# Altium footprint library LimeMicroAltiumLib.PcbLib: 876 footprints (part 23 of 57)
Each footprint in its own frame and in the unit in brackets; x right, y up, seen from the top. Pads: shape width x height; smd on the part's side, far side on the other; paste and mask are expansions set on the pad; w line width, h text height; cw(c..) or ccw(c..) is an arc to the next point about the centre after c.
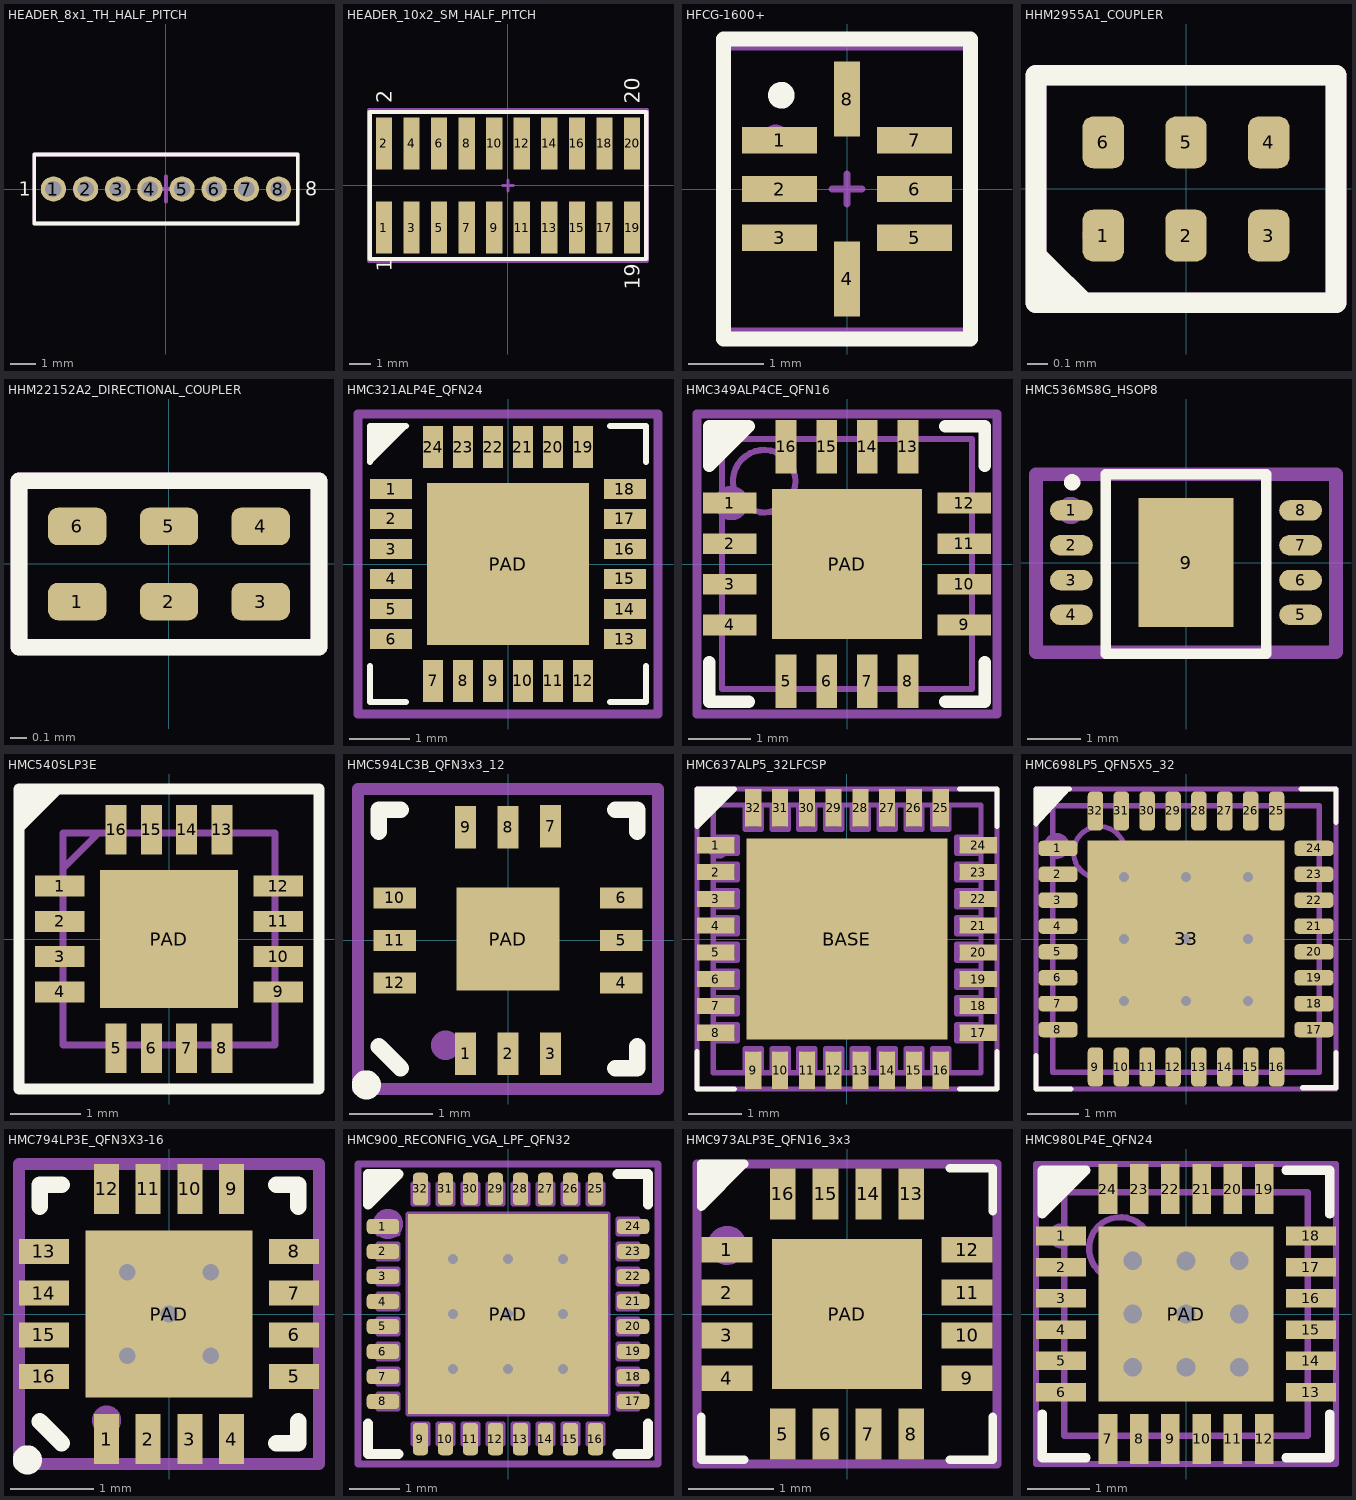
[diagram p22: the footprints below, top view; thin cyan lines are the x and y axes]

## HEADER_8x1_TH_HALF_PITCH [mm]
pads (8):
  round 1 hole 0.65 mask+0.05: 1(-4.445,0) 2(-3.175,0) 3(-1.905,0) 4(-0.635,0) 5(0.635,0) 6(1.905,0) 7(3.175,0) 8(4.445,0)
Top Overlay:
  lines w0.15: -5.205,-1.365 5.205,-1.365 5.205,1.365 -5.205,1.365 -5.205,-1.365
  text "1" at -5.805,-0.265 h0.55
  text "8" at 5.495,-0.265 h0.55
Mechanical 15:
  lines w0.15: -0.5,0 0,0 ; 0,-0.5 0,0 ; 0,0.5 0,0 ; 0.5,0 0,0 ; -5.205,-1.365 -5.205,1.365 5.205,1.365 5.205,-1.365 -5.205,-1.365
  text "1" at -4.53,-0.29 h0.55
  text "8" at 4.295,-0.265 h0.55
  text ".Designator" at 0,0 h0.55
3D body "User Library-PinHeader1_27_2.STEP": height 5, standoff -2.3, extent 2.54,-1.2 5.08,1.2
3D body "User Library-PinHeader1_27_2.STEP": height 5, standoff -2.3, extent -2.54,-1.2 0,1.2
3D body "User Library-PinHeader1_27_2.STEP": height 5, standoff -2.3, extent -5.08,-1.2 -2.54,1.2
3D body "User Library-PinHeader1_27_2.STEP": height 5, standoff -2.3, extent 0,-1.2 2.54,1.2

## HEADER_10x2_SM_HALF_PITCH [mm]
pads (20):
  rect 0.75x2.4 smd: 1(-5.737,-1.95) 2(-5.737,1.95) 3(-4.462,-1.95) 4(-4.462,1.95) 5(-3.187,-1.95) 6(-3.187,1.95) 7(-1.912,-1.95) 8(-1.913,1.95) 9(-0.637,-1.95) 10(-0.638,1.95) 11(0.638,-1.95) 12(0.637,1.95) 13(1.913,-1.95) 14(1.912,1.95) 15(3.188,-1.95) 16(3.187,1.95) 17(4.463,-1.95) 18(4.462,1.95) 19(5.737,-1.95) 20(5.737,1.95)
Top Overlay:
  lines w0.2: -6.387,-3.4 -6.387,3.4 6.388,3.4 6.388,-3.4 -6.387,-3.4
  text "1" at -5.387,-4 h0.7
  text "19" at 6.087,-4.825 h0.7
  text "2" at -5.387,3.8 h0.7
  text "20" at 6.087,3.775 h0.7
Mechanical 15:
  lines w0.15: -0.25,0 0.25,0 ; 0,-0.25 0,0.25 ; -6.437,-3.5 -6.437,3.5 6.438,3.5 6.438,-3.5 -6.437,-3.5
  text ".designator" at 0,0 h0.55
3D body "pin_header_a-sl127-dg-g02mp1.stp": height 6.37, standoff -0.03, extent 5.093,-2.752 6.362,2.752
3D body "pin_header_a-sl127-dg-g02mp1.stp": height 6.37, standoff -0.03, extent 3.818,-2.752 5.087,2.752
3D body "pin_header_a-sl127-dg-g02mp1.stp": height 6.37, standoff -0.03, extent 2.543,-2.752 3.812,2.752
3D body "pin_header_a-sl127-dg-g02mp1.stp": height 6.37, standoff -0.03, extent 1.268,-2.752 2.537,2.752
3D body "pin_header_a-sl127-dg-g02mp1.stp": height 6.37, standoff -0.03, extent -0.007,-2.752 1.262,2.752
3D body "pin_header_a-sl127-dg-g02mp1.stp": height 6.37, standoff -0.03, extent -6.362,-2.752 -5.092,2.752
3D body "pin_header_a-sl127-dg-g02mp1.stp": height 6.37, standoff -0.03, extent -5.092,-2.752 -3.822,2.752
3D body "pin_header_a-sl127-dg-g02mp1.stp": height 6.37, standoff -0.03, extent -3.822,-2.752 -2.552,2.752
3D body "pin_header_a-sl127-dg-g02mp1.stp": height 6.37, standoff -0.03, extent -2.552,-2.752 -1.282,2.752
3D body "pin_header_a-sl127-dg-g02mp1.stp": height 6.37, standoff -0.03, extent -1.282,-2.752 -0.013,2.752

## HFCG-1600+ [mm]
pads (8):
  rect 1x0.35 smd mask+0.05: 1(-0.9,0.65) 2(-0.9,0) 3(-0.9,-0.65) 5(0.9,-0.65) 6(0.9,0) 7(0.9,0.65)
  rect 0.35x1 smd mask+0.05: 4(0,-1.2) 8(0,1.2)
Top Overlay:
  circle w0.254: c-0.875,1.25 r0.05
  lines w0.2: -0.162,2 1.65,2 1.65,-2 -1.65,-2 -1.65,2 0.162,2
Mechanical 15:
  circle w0.254: c-0.95,0.675 r0.056
  lines w0.1: -0.2,0 0,0 ; 0,-0.2 0,0 ; 0,0.2 0,0 ; 0.2,0 0,0 ; -1.6,-1.9 1.6,-1.9 1.6,1.9 -1.6,1.9 -1.6,-1.9
  text ".Designator" at 0,0 h0.55
3D body: height 0.96, standoff 0, extent -0.198,0.3 0.2,0.7
3D body: height 0.95, standoff 0, extent -0.625,-1 0.625,1

## HHM2955A1_COUPLER [mm]
pads (6):
  rrect50% 0.2x0.25 smd mask+0.05: 1(-0.4,-0.225) 2(0,-0.225) 3(0.4,-0.225) 4(0.4,0.225) 5(0,0.225) 6(-0.4,0.225)
Top Overlay:
  region: -0.725,-0.55 -0.725,-0.3 -0.675,-0.3 -0.425,-0.55
  lines w0.1: -0.725,-0.55 -0.725,0.55 0.725,0.55 0.725,-0.55 -0.725,-0.55
Mechanical 15:
  circle w0.1: c-0.4,-0.225 r0.05
  lines w0.1: -0.725,-0.55 0.725,-0.55 0.725,0.55 -0.725,0.55 -0.725,-0.55
  text ".Designator" at 0,0 h0.55
3D body: height 0.61, standoff 0, extent -0.449,-0.2 -0.25,0
3D body: height 0.6, standoff 0, extent -0.5,-0.25 0.5,0.25

## HHM22152A2_DIRECTIONAL_COUPLER [mm]
pads (6):
  rrect50% 0.35x0.225 smd mask+0.05: 1(-0.55,-0.225) 2(0,-0.225) 3(0.55,-0.225) 4(0.55,0.225) 5(0,0.225) 6(-0.55,0.225)
Top Overlay:
  lines w0.1: -0.9,-0.5 0.9,-0.5 0.9,0.5 -0.9,0.5 -0.9,-0.5
Mechanical 15:
  circle w0.1: c-0.55,-0.225 r0.05
  lines w0.1: -0.9,-0.5 0.9,-0.5 0.9,0.5 -0.9,0.5 -0.9,-0.5
  text ".Designator" at 0,0 h0.55
3D body: height 0.61, standoff 0, extent -0.7,-0.3 -0.5,-0.1
3D body: height 0.6, standoff 0, extent -0.8,-0.4 0.8,0.4

## HMC321ALP4E_QFN24 [mm]
pads (25):
  rect 0.7x0.34 smd mask+0.05: 1(-1.95,1.25) 2(-1.95,0.75) 3(-1.95,0.25) 4(-1.95,-0.25) 5(-1.95,-0.75) 6(-1.95,-1.25) 13(1.95,-1.25) 14(1.95,-0.75) 15(1.95,-0.25) 16(1.95,0.25) 17(1.95,0.75) 18(1.95,1.25)
  rect 0.34x0.7 smd mask+0.05: 7(-1.25,-1.95) 8(-0.75,-1.95) 9(-0.25,-1.95) 10(0.25,-1.95) 11(0.75,-1.95) 12(1.25,-1.95) 19(1.25,1.95) 20(0.75,1.95) 21(0.25,1.95) 22(-0.25,1.95) 23(-0.75,1.95) 24(-1.25,1.95)
  rect 2.7x2.7 smd mask+0.05: PAD(0,0)
Top Overlay:
  region: -2.3,2.3 -1.65,2.3 -2.3,1.65
  lines w0.1: -2.3,-1.7 -2.3,-2.3 -1.7,-2.3 ; -2.3,1.7 -2.3,2.3 -1.7,2.3 ; 1.7,-2.3 2.3,-2.3 2.3,-1.7 ; 1.7,2.3 2.3,2.3 2.3,1.7
Top Solder:
  region: -1.475,-1.55 1.475,-1.55 1.475,-2.35 -1.475,-2.35
  region: 1.55,-1.475 1.55,1.475 2.35,1.475 2.35,-1.475
  region: 1.475,1.55 -1.475,1.55 -1.475,2.35 1.475,2.35
  region: -1.55,1.475 -1.55,-1.475 -2.35,-1.475 -2.35,1.475
Mechanical 15:
  circle w0.1: c-1.975,1.25 r0.05
  lines w0.15: -0.2,0 0.2,0 ; 0,-0.2 0,0.2 ; -2.5,-2.5 -2.5,2.5 2.5,2.5 2.5,-2.5 -2.5,-2.5
  text ".Designator" at 0,0 h0.55
3D body "User Library-QFN 24 4x4.step": height 0.9, standoff 0, extent -2.002,-2.002 2.002,2.002

## HMC349ALP4CE_QFN16 [mm]
pads (17):
  rect 0.85x0.33 smd mask+0.05: 1(-1.875,0.975) 2(-1.875,0.325) 3(-1.875,-0.325) 4(-1.875,-0.975) 9(1.875,-0.975) 10(1.875,-0.325) 11(1.875,0.325) 12(1.875,0.975)
  rect 0.33x0.85 smd mask+0.05: 5(-0.975,-1.875) 6(-0.325,-1.875) 7(0.325,-1.875) 8(0.975,-1.875) 13(0.975,1.875) 14(0.325,1.875) 15(-0.325,1.875) 16(-0.975,1.875)
  rect 2.4x2.4 smd mask+0.05: PAD(0,0)
Top Overlay:
  region: -2.2,1.575 -2.2,2.2 -1.575,2.2
  lines w0.2: -2.2,-1.575 -2.2,-2.2 -1.575,-2.2 ; 1.575,-2.2 2.2,-2.2 2.2,-1.575 ; 1.575,2.2 2.2,2.2 2.2,1.575 ; -2.2,1.575 -1.575,2.2 -2.2,2.2 -2.2,1.575
Mechanical 13:
  circle w0.1: c-1.325,1.325 r0.5
  lines w0.1: -2,-2 2,-2 2,2 -2,2 -2,-2
Mechanical 15:
  circle w0.35: c-1.85,0.975 r0.1
  lines w0.15: -0.525,0.025 0.475,0.025 ; -0.025,-0.475 -0.025,0.525 ; -2.4,-2.4 2.4,-2.4 2.4,2.4 -2.4,2.4 -2.4,-2.4
  text ".Designator" at 0,0 h0.55
3D body "User Library-qfn16-4x4.step": height 0.92, standoff 0, extent -2,-2 2,2

## HMC536MS8G_HSOP8 [mm]
pads (9):
  oval 0.8x0.38 smd: 1(-2.14,0.975) 2(-2.14,0.325) 3(-2.14,-0.325) 4(-2.14,-0.975) 5(2.14,-0.975) 6(2.14,-0.325) 7(2.14,0.325) 8(2.14,0.975)
  rect 1.78x2.41 smd: 9(0,0)
Top Overlay:
  circle w0.254: c-2.125,1.5 r0.025
  lines w0.2: -1.5,-1.7 1.5,-1.7 1.5,1.65 0.679,1.65 -1.5,1.65 -1.5,-1.7
Mechanical 15:
  circle w0.254: c-2.15,0.975 r0.127
  lines w0.254: -0.2,0 0,0 ; 0,-0.2 0,0 ; 0,0.2 0,0 ; 0.2,0 0,0 ; -2.8,-1.675 2.8,-1.675 2.8,1.65 -2.8,1.65 -2.8,-1.675
  text ".Designator" at 0,0 h0.55
3D body "User Library-SSOP-8-1.STEP": height 1.3, standoff 0, extent -2.1,-1.575 2.15,1.575

## HMC540SLP3E [mm]
height 4.5
pads (17):
  rect 0.7x0.3 smd mask+0.05: 1(-1.55,0.75) 2(-1.55,0.25) 3(-1.55,-0.25) 4(-1.55,-0.75) 9(1.55,-0.75) 10(1.55,-0.25) 11(1.55,0.25) 12(1.55,0.75)
  rect 0.3x0.7 smd mask+0.05: 5(-0.75,-1.55) 6(-0.25,-1.55) 7(0.25,-1.55) 8(0.75,-1.55) 13(0.75,1.55) 14(0.25,1.55) 15(-0.25,1.55) 16(-0.75,1.55)
  rect 1.95x1.95 smd mask+0.05: PAD(0,0)
Top Overlay:
  region: -2.125,2.125 -2.1,2.1 -2.1,1.5 -1.5,2.1
  lines w0.15: -2.125,-2.125 2.125,-2.125 2.125,2.125 -2.125,2.125 -2.125,-2.125
Mechanical 13:
  lines w0.1: -1.5,1 -1,1.5 ; -1.5,-1.5 -1.5,1.5 1.5,1.5 1.5,-1.5 -1.5,-1.5
Mechanical 15:
  circle w0.127: c-1.549,0.762 r0.051
  lines w0.1: -2.125,-2.125 -2.125,2.125 2.125,2.125 2.125,-2.125 -2.125,-2.125
  lines w0.15: -0.5,0 0.5,0 ; 0,-0.5 0,0.5
  text ".Designator" at 0,0 h0.55
3D body "HMC540SLP3ETR.stp": height 1, standoff 0, extent -1.55,-1.55 1.55,1.55

## HMC594LC3B_QFN3x3_12 [mm] "Quad Flat No Lead, Plastic; 16 Terminals; Body 3 x 3 mm; Pitch 0.5 mm"
height 0.8
pads (13):
  rect 0.25x0.51 smd mask+0.05: 1(-0.51,-1.36) 2(0,-1.36) 3(0.51,-1.36) 7(0.51,1.37) 8(0,1.36) 9(-0.51,1.36)
  rect 0.51x0.25 smd mask+0.05: 4(1.36,-0.51) 5(1.36,0) 6(1.36,0.51) 10(-1.36,0.51) 11(-1.36,0) 12(-1.36,-0.51)
  rect 1.24x1.24 smd mask+0.05: PAD(0,0.017)
Top Overlay:
  circle w0.25: c-1.7,-1.733 r0.05
  lines w0.2: -1.55,-1.272 -1.29,-1.532 ; -1.55,1.308 -1.55,1.568 -1.29,1.568 ; 1.29,-1.532 1.55,-1.532 1.55,-1.272 ; 1.29,1.568 1.55,1.568 1.55,1.308
Mechanical 15:
  circle w0.3: c-0.75,-1.258 r0.025
  lines w0.15: -0.475,0.017 0,0.017 ; 0,-0.458 0,0.017 ; 0,0.492 0,0.017 ; 0.475,0.017 0,0.017 ; -1.8,-1.783 1.8,-1.783 1.8,1.817 -1.8,1.817 -1.8,-1.783
  text ".Designator" at 0,0.017 h0.55
3D body "User Library-QFN12_3x3x0_8.STEP": height 0.78, standoff -0.02, extent -1.51,-1.492 1.51,1.528

## HMC637ALP5_32LFCSP [mm]
pads (33):
  rect 0.7x0.3 smd mask+0.05: 1(-2.45,1.75) 2(-2.45,1.25) 3(-2.45,0.75) 4(-2.45,0.25) 5(-2.45,-0.25) 6(-2.45,-0.75) 7(-2.45,-1.25) 8(-2.45,-1.75) 17(2.45,-1.75) 18(2.45,-1.25) 19(2.45,-0.75) 20(2.45,-0.25) 21(2.45,0.25) 22(2.45,0.75) 23(2.45,1.25) 24(2.45,1.75)
  rect 0.3x0.7 smd mask+0.05: 9(-1.75,-2.45) 10(-1.25,-2.45) 11(-0.75,-2.45) 12(-0.25,-2.45) 13(0.25,-2.45) 14(0.75,-2.45) 15(1.25,-2.45) 16(1.75,-2.45) 25(1.75,2.45) 26(1.25,2.45) 27(0.75,2.45) 28(0.25,2.45) 29(-0.25,2.45) 30(-0.75,2.45) 31(-1.25,2.45) 32(-1.75,2.45)
  rect 3.75x3.75 smd mask+0.05: BASE(0,0)
Top Overlay:
  region: -2.8,2.1 -2.8,2.8 -2.1,2.8
  lines w0.1: -2.8,-2.1 -2.8,-2.8 -2.1,-2.8 ; 2.1,-2.8 2.8,-2.8 2.8,-2.1 ; 2.1,2.8 2.8,2.8 2.8,2.1 ; -2.8,2.1 -2.1,2.8 -2.8,2.8 -2.8,2.1
Mechanical 13:
  lines w0.1: -2.5,-2.5 -2.5,2.5 2.5,2.5 2.5,-2.5 -2.5,-2.5 ; -2.5,-1.9 -2.05,-1.9 -2.05,-1.6 -2.5,-1.6 -2.5,-1.9 ; -2.5,-1.4 -2.5,-1.1 -2.05,-1.1 -2.05,-1.4 -2.5,-1.4 ; -2.5,-0.9 -2.05,-0.9 -2.05,-0.6 -2.5,-0.6 -2.5,-0.9 ; -2.5,-0.4 -2.5,-0.1 -2.05,-0.1 -2.05,-0.4 -2.5,-0.4 ; -2.5,0.1 -2.5,0.4 -2.05,0.4 -2.05,0.1 -2.5,0.1 ; -2.5,0.6 -2.5,0.9 -2.05,0.9 -2.05,0.6 -2.5,0.6 ; -2.5,1.1 -2.05,1.1 -2.05,1.4 -2.5,1.4 -2.5,1.1 ; -2.5,1.6 -2.05,1.6 -2.05,1.9 -2.5,1.9 -2.5,1.6 ; -1.9,-2.5 -1.9,-2.05 -1.6,-2.05 -1.6,-2.5 -1.9,-2.5 ; -1.9,2.05 -1.6,2.05 -1.6,2.5 -1.9,2.5 -1.9,2.05 ; -1.4,-2.5 -1.1,-2.5 -1.1,-2.05 -1.4,-2.05 -1.4,-2.5 ; -1.4,2.05 -1.4,2.5 -1.1,2.5 -1.1,2.05 -1.4,2.05 ; -0.9,-2.5 -0.9,-2.05 -0.6,-2.05 -0.6,-2.5 -0.9,-2.5 ; -0.9,2.05 -0.6,2.05 -0.6,2.5 -0.9,2.5 -0.9,2.05 ; -0.4,-2.5 -0.1,-2.5 -0.1,-2.05 -0.4,-2.05 -0.4,-2.5 ; -0.4,2.05 -0.4,2.5 -0.1,2.5 -0.1,2.05 -0.4,2.05 ; 0.1,-2.5 0.4,-2.5 0.4,-2.05 0.1,-2.05 0.1,-2.5 ; 0.1,2.05 0.1,2.5 0.4,2.5 0.4,2.05 0.1,2.05 ; 0.6,-2.5 0.9,-2.5 0.9,-2.05 0.6,-2.05 0.6,-2.5 ; 0.6,2.05 0.6,2.5 0.9,2.5 0.9,2.05 0.6,2.05 ; 1.1,-2.5 1.1,-2.05 1.4,-2.05 1.4,-2.5 1.1,-2.5 ; 1.1,2.05 1.4,2.05 1.4,2.5 1.1,2.5 1.1,2.05 ; 1.6,-2.5 1.6,-2.05 1.9,-2.05 1.9,-2.5 1.6,-2.5 ; 1.6,2.05 1.9,2.05 1.9,2.5 1.6,2.5 1.6,2.05 ; 2.05,-1.9 2.5,-1.9 2.5,-1.6 2.05,-1.6 2.05,-1.9 ; 2.05,-1.4 2.05,-1.1 2.5,-1.1 2.5,-1.4 2.05,-1.4 ; 2.05,-0.9 2.5,-0.9 2.5,-0.6 2.05,-0.6 2.05,-0.9 ; 2.05,-0.4 2.05,-0.1 2.5,-0.1 2.5,-0.4 2.05,-0.4 ; 2.05,0.1 2.05,0.4 2.5,0.4 2.5,0.1 2.05,0.1 ; 2.05,0.6 2.05,0.9 2.5,0.9 2.5,0.6 2.05,0.6 ; 2.05,1.1 2.5,1.1 2.5,1.4 2.05,1.4 2.05,1.1 ; 2.05,1.6 2.5,1.6 2.5,1.9 2.05,1.9 2.05,1.6
Mechanical 15:
  circle w0.2: c-2.4,1.7 r0.1
  lines w0.1: -0.4,0 0,0 ; 0,-0.4 0,0 ; 0,0.4 0,0 ; 0.4,0 0,0 ; -2.8,-2.8 -2.8,2.8 2.8,2.8 2.8,-2.8 -2.8,-2.8
  text ".Designator" at 0,0 h0.55
3D body: height 0.8, standoff 0, extent -2.5,-2.5 2.5,2.5
3D body: height 0.81, standoff 0, extent -2.299,1.9 -1.901,2.3

## HMC698LP5_QFN5X5_32 [mm] "QFN, 32-Leads, Body 5x5mm, Pitch 0.5mm, IPC High Density"
height 1
pads (33):
  rrect50% 0.75x0.3 smd mask+0.05: 1(-2.475,1.75) 2(-2.475,1.25) 3(-2.475,0.75) 4(-2.475,0.25) 5(-2.475,-0.25) 6(-2.475,-0.75) 7(-2.475,-1.25) 8(-2.475,-1.75) 17(2.475,-1.75) 18(2.475,-1.25) 19(2.475,-0.75) 20(2.475,-0.25) 21(2.475,0.25) 22(2.475,0.75) 23(2.475,1.25) 24(2.475,1.75)
  rrect50% 0.3x0.75 smd mask+0.05: 9(-1.75,-2.475) 10(-1.25,-2.475) 11(-0.75,-2.475) 12(-0.25,-2.475) 13(0.25,-2.475) 14(0.75,-2.475) 15(1.25,-2.475) 16(1.75,-2.475) 25(1.75,2.475) 26(1.25,2.475) 27(0.75,2.475) 28(0.25,2.475) 29(-0.25,2.475) 30(-0.75,2.475) 31(-1.25,2.475) 32(-1.75,2.475)
  rect 3.8x3.8 smd mask+0.05: 33(0,0)
via -1.2,1.2 diameter 0.3 hole 0.2
via 0,1.2 diameter 0.3 hole 0.2
via 1.2,1.2 diameter 0.3 hole 0.2
via -1.2,0 diameter 0.3 hole 0.2
via 0,0 diameter 0.3 hole 0.2
via 1.2,0 diameter 0.3 hole 0.2
via -1.2,-1.2 diameter 0.3 hole 0.2
via 0,-1.2 diameter 0.3 hole 0.2
via 1.2,-1.2 diameter 0.3 hole 0.2
Top Overlay:
  region: -2.9,2.175 -2.227,2.9 -2.9,2.9
  lines w0.1: -2.9,-2.25 -2.9,-2.9 -2.225,-2.9 ; -2.9,2.225 -2.9,2.9 -2.25,2.9 ; 2.225,2.9 2.9,2.9 2.9,2.25 ; 2.25,-2.875 2.9,-2.875 2.9,-2.2
Mechanical 13:
  circle w0.1: c-1.675,1.675 r0.5
  lines w0.1: -2.575,-2.575 -2.575,2.575 2.575,2.575 2.575,-2.575 -2.575,-2.575
Mechanical 15:
  circle w0.25: c-2.5,1.8 r0.125
  lines w0.1: -0.5,0 0.5,0 ; 0,-0.5 0,0.5 ; -2.9,-2.9 -2.9,2.9 2.9,2.9 2.9,-2.9 -2.9,-2.9
  text ".Designator" at 0,0 h0.55
3D body "HCP_32_1.step": height 0.97, standoff 0, extent -2.5,-2.5 2.5,2.5

## HMC794LP3E_QFN3X3-16 [mm] "Quad Flat No Lead, Plastic; 16 Terminals; Body 3 x 3 mm; Pitch 0.5 mm"
height 0.8
pads (17):
  rect 0.3x0.6 smd mask+0.05: 1(-0.75,-1.5) 2(-0.25,-1.5) 3(0.25,-1.5) 4(0.75,-1.5) 9(0.75,1.5) 10(0.25,1.5) 11(-0.25,1.5) 12(-0.75,1.5)
  rect 0.6x0.3 smd mask+0.05: 5(1.5,-0.75) 6(1.5,-0.25) 7(1.5,0.25) 8(1.5,0.75) 13(-1.5,0.75) 14(-1.5,0.25) 15(-1.5,-0.25) 16(-1.5,-0.75)
  rect 2x2 smd mask+0.05: PAD(0,0)
via 0,0 diameter 0.5 hole 0.2
via -0.5,0.5 diameter 0.5 hole 0.2
via 0.5,0.5 diameter 0.5 hole 0.2
via 0.5,-0.5 diameter 0.5 hole 0.2
via -0.5,-0.5 diameter 0.5 hole 0.2
Top Overlay:
  circle w0.25: c-1.7,-1.75 r0.05
  lines w0.2: -1.55,-1.29 -1.29,-1.55 ; -1.55,1.29 -1.55,1.55 -1.29,1.55 ; 1.29,-1.55 1.55,-1.55 1.55,-1.29 ; 1.29,1.55 1.55,1.55 1.55,1.29
Mechanical 15:
  circle w0.3: c-0.75,-1.275 r0.025
  lines w0.15: -0.475,0 0,0 ; 0,-0.475 0,0 ; 0,0.475 0,0 ; 0.475,0 0,0 ; -1.8,-1.8 -1.8,1.8 1.8,1.8 1.8,-1.8 -1.8,-1.8
  text ".Designator" at 0,0 h0.55
3D body "User Library-QFN16-1.step": height 0.89, standoff 0, extent -1.55,-1.55 1.55,1.55

## HMC900_RECONFIG_VGA_LPF_QFN32 [mm] "QFN, 24-Leads, Body 4,00x4,00mm, Pitch 0,50mm, Thermal Pad 2,55x2,55mm, IPC Medium Density"
height 0.8
pads (33):
  rrect50% 0.65x0.3 smd mask+0.05: 1(-2.5,1.75) 2(-2.5,1.25) 3(-2.5,0.75) 4(-2.5,0.25) 5(-2.5,-0.25) 6(-2.5,-0.75) 7(-2.5,-1.25) 8(-2.5,-1.75) 17(2.5,-1.75) 18(2.5,-1.25) 19(2.5,-0.75) 20(2.5,-0.25) 21(2.5,0.25) 22(2.5,0.75) 23(2.5,1.25) 24(2.5,1.75)
  rrect50% 0.3x0.65 smd mask+0.05: 9(-1.75,-2.5) 10(-1.25,-2.5) 11(-0.75,-2.5) 12(-0.25,-2.5) 13(0.25,-2.5) 14(0.75,-2.5) 15(1.25,-2.5) 16(1.75,-2.5) 25(1.75,2.5) 26(1.25,2.5) 27(0.75,2.5) 28(0.25,2.5) 29(-0.25,2.5) 30(-0.75,2.5) 31(-1.25,2.5) 32(-1.75,2.5)
  rect 4x4 smd mask+0.05: PAD(0,0)
via 0,0 diameter 0.5 hole 0.2
via -1.1,0 diameter 0.5 hole 0.2
via 1.1,0 diameter 0.5 hole 0.2
via -1.1,1.1 diameter 0.5 hole 0.2
via 0,1.1 diameter 0.5 hole 0.2
via 1.1,1.1 diameter 0.5 hole 0.2
via 1.1,-1.1 diameter 0.5 hole 0.2
via 0,-1.1 diameter 0.5 hole 0.2
via -1.1,-1.1 diameter 0.5 hole 0.2
Top Overlay:
  region: -2.8,2.185 -2.8,2.8 -2.185,2.8
  lines w0.2: -2.8,-2.185 -2.8,-2.8 -2.185,-2.8 ; 2.185,-2.8 2.8,-2.8 2.8,-2.185 ; 2.185,2.8 2.8,2.8 2.8,2.185 ; -2.8,2.185 -2.185,2.8 -2.8,2.8 -2.8,2.185
Mechanical 13:
  circle w0.1: c-1.05,1.05 r0.5
  lines w0.1: -2.6,-1.9 -2.2,-1.9 -2.2,-1.6 -2.6,-1.6 -2.6,-1.9 ; -2.6,-1.4 -2.2,-1.4 -2.2,-1.1 -2.6,-1.1 -2.6,-1.4 ; -2.6,-0.9 -2.2,-0.9 -2.2,-0.6 -2.6,-0.6 -2.6,-0.9 ; -2.6,-0.4 -2.2,-0.4 -2.2,-0.1 -2.6,-0.1 -2.6,-0.4 ; -2.6,0.1 -2.2,0.1 -2.2,0.4 -2.6,0.4 -2.6,0.1 ; -2.6,0.6 -2.2,0.6 -2.2,0.9 -2.6,0.9 -2.6,0.6 ; -2.6,1.1 -2.2,1.1 -2.2,1.4 -2.6,1.4 -2.6,1.1 ; -2.6,1.6 -2.2,1.6 -2.2,1.9 -2.6,1.9 -2.6,1.6 ; -2,-2 2,-2 2,2 -2,2 -2,-2 ; -1.95,-1.95 1.95,-1.95 1.95,1.95 -1.95,1.95 -1.95,-1.95 ; -1.9,-2.6 -1.6,-2.6 -1.6,-2.2 -1.9,-2.2 -1.9,-2.6 ; -1.9,2.2 -1.6,2.2 -1.6,2.6 -1.9,2.6 -1.9,2.2 ; -1.4,-2.6 -1.1,-2.6 -1.1,-2.2 -1.4,-2.2 -1.4,-2.6 ; -1.4,2.2 -1.4,2.6 -1.1,2.6 -1.1,2.2 -1.4,2.2 ; -0.9,-2.6 -0.6,-2.6 -0.6,-2.2 -0.9,-2.2 -0.9,-2.6 ; -0.9,2.2 -0.9,2.6 -0.6,2.6 -0.6,2.2 -0.9,2.2 ; -0.4,-2.6 -0.1,-2.6 -0.1,-2.2 -0.4,-2.2 -0.4,-2.6 ; -0.4,2.2 -0.4,2.6 -0.1,2.6 -0.1,2.2 -0.4,2.2 ; 0.1,-2.6 0.4,-2.6 0.4,-2.2 0.1,-2.2 0.1,-2.6 ; 0.1,2.2 0.1,2.6 0.4,2.6 0.4,2.2 0.1,2.2 ; 0.6,-2.6 0.9,-2.6 0.9,-2.2 0.6,-2.2 0.6,-2.6 ; 0.6,2.2 0.6,2.6 0.9,2.6 0.9,2.2 0.6,2.2 ; 1.1,-2.6 1.4,-2.6 1.4,-2.2 1.1,-2.2 1.1,-2.6 ; 1.1,2.2 1.1,2.6 1.4,2.6 1.4,2.2 1.1,2.2 ; 1.6,-2.6 1.9,-2.6 1.9,-2.2 1.6,-2.2 1.6,-2.6 ; 1.6,2.2 1.6,2.6 1.9,2.6 1.9,2.2 1.6,2.2 ; 2.2,-1.9 2.2,-1.6 2.6,-1.6 2.6,-1.9 2.2,-1.9 ; 2.2,-1.4 2.2,-1.1 2.6,-1.1 2.6,-1.4 2.2,-1.4 ; 2.2,-0.9 2.2,-0.6 2.6,-0.6 2.6,-0.9 2.2,-0.9 ; 2.2,-0.4 2.2,-0.1 2.6,-0.1 2.6,-0.4 2.2,-0.4 ; 2.2,0.1 2.2,0.4 2.6,0.4 2.6,0.1 2.2,0.1 ; 2.2,0.6 2.2,0.9 2.6,0.9 2.6,0.6 2.2,0.6 ; 2.2,1.1 2.2,1.4 2.6,1.4 2.6,1.1 2.2,1.1 ; 2.2,1.6 2.6,1.6 2.6,1.9 2.2,1.9 2.2,1.6
Mechanical 15:
  circle w0.4: c-2.4,1.8 r0.1
  lines w0.15: -0.5,0 0.5,0 ; 0,-0.5 0,0.5 ; -3,-3 3,-3 3,3 -3,3 -3,-3
  text ".Designator" at 0,0 h0.55
3D body "User Library-qfn32-5x5.step": height 0.8, standoff 0, extent -2.52,-2.51 2.501,2.51

## HMC973ALP3E_QFN16_3x3 [mm]
pads (17):
  rect 0.6x0.3 smd mask+0.05: 1(-1.4,0.75) 2(-1.4,0.25) 3(-1.4,-0.25) 4(-1.4,-0.75) 9(1.4,-0.75) 10(1.4,-0.25) 11(1.4,0.25) 12(1.4,0.75)
  rect 0.3x0.6 smd mask+0.05: 5(-0.75,-1.4) 6(-0.25,-1.4) 7(0.25,-1.4) 8(0.75,-1.4) 13(0.75,1.4) 14(0.25,1.4) 15(-0.25,1.4) 16(-0.75,1.4)
  rect 1.75x1.75 smd mask+0.05: PAD(0,0)
Top Overlay:
  region: -1.7,1.25 -1.2,1.75 -1.7,1.75
  lines w0.1: -1.7,-1.2 -1.7,-1.7 -1.2,-1.7 ; 1.2,-1.7 1.7,-1.7 1.7,-1.2 ; 1.2,1.7 1.7,1.7 1.7,1.2 ; -1.7,1.25 -1.2,1.75 -1.7,1.75 -1.7,1.25
Mechanical 15:
  circle w0.254: c-1.4,0.8 r0.1
  lines w0.1: -0.2,0 0,0 ; 0,-0.2 0,0 ; 0,0.2 0,0 ; 0.2,0 0,0 ; -1.75,-1.75 1.75,-1.75 1.75,1.75 -1.75,1.75 -1.75,-1.75
  text ".Designator" at 0,0 h0.55
3D body "AD8338ACPZ-R7.stp": height 0.8, standoff 0, extent -1.55,-1.55 1.55,1.55

## HMC980LP4E_QFN24 [mm]
pads (25):
  rect 0.8x0.3 smd mask+0.05: 1(-2,1.25) 2(-2,0.75) 3(-2,0.25) 4(-2,-0.25) 5(-2,-0.75) 6(-2,-1.25) 13(2,-1.25) 14(2,-0.75) 15(2,-0.25) 16(2,0.25) 17(2,0.75) 18(2,1.25)
  rect 0.3x0.8 smd mask+0.05: 7(-1.25,-2) 8(-0.75,-2) 9(-0.25,-2) 10(0.25,-2) 11(0.75,-2) 12(1.25,-2) 19(1.25,2) 20(0.75,2) 21(0.25,2) 22(-0.25,2) 23(-0.75,2) 24(-1.25,2)
  rect 2.8x2.8 smd mask+0.05: PAD(0,0)
via 0.85,0.85 diameter 0.5 hole 0.3
via -0.85,0.85 diameter 0.5 hole 0.3
via 0,0.85 diameter 0.5 hole 0.3
via 0,-0.85 diameter 0.5 hole 0.3
via 0.85,-0.85 diameter 0.5 hole 0.3
via -0.85,-0.85 diameter 0.5 hole 0.3
via -0.85,0 diameter 0.5 hole 0.3
via 0.85,0 diameter 0.5 hole 0.3
via 0,0 diameter 0.5 hole 0.3
Top Overlay:
  region: -2.3,1.6 -2.3,2.3 -1.6,2.3
  lines w0.15: -2.3,-1.6 -2.3,-2.3 -1.6,-2.3 ; 1.6,-2.3 2.3,-2.3 2.3,-1.6 ; 1.6,2.3 2.3,2.3 2.3,1.6 ; -2.3,1.6 -1.6,2.3 -2.3,2.3 -2.3,1.6
Mechanical 13:
  circle w0.1: c-1.05,1.05 r0.5
  lines w0.1: -1.95,-1.95 -1.95,1.95 1.95,1.95 1.95,-1.95 -1.95,-1.95
Mechanical 15:
  circle w0.2: c-2,1.25 r0.1
  lines w0.1: -0.5,0 0.5,0 ; 0,-0.5 0,0.5 ; -2.4,-2.4 -2.4,2.4 2.4,2.4 2.4,-2.4 -2.4,-2.4
  text ".Designator" at 0,0 h0.55
3D body "User Library-QFN24-0_5.STEP": height 1, standoff 0, extent -2,-2 2,2